# Altium schematic symbol library Pad Connector.SchLib: 1 symbol
Pins are listed as number, name and electrical type; pins without a type are passive.

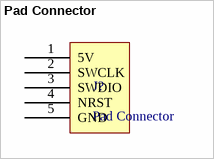
[diagram p0: symbol Pad Connector]

## Pad Connector
designator J?
footprint Pad Connector PCB
pins: 1 5V, 2 SWCLK, 3 SWDIO, 4 NRST, 5 GND